# Altium footprint library Footprint.PcbLib: 411 footprints (part 23 of 26)
Each footprint in its own frame and in the unit in brackets; x right, y up, seen from the top. Pads: shape width x height; smd on the part's side, far side on the other; paste and mask are expansions set on the pad; w line width, h text height; cw(c..) or ccw(c..) is an arc to the next point about the centre after c.
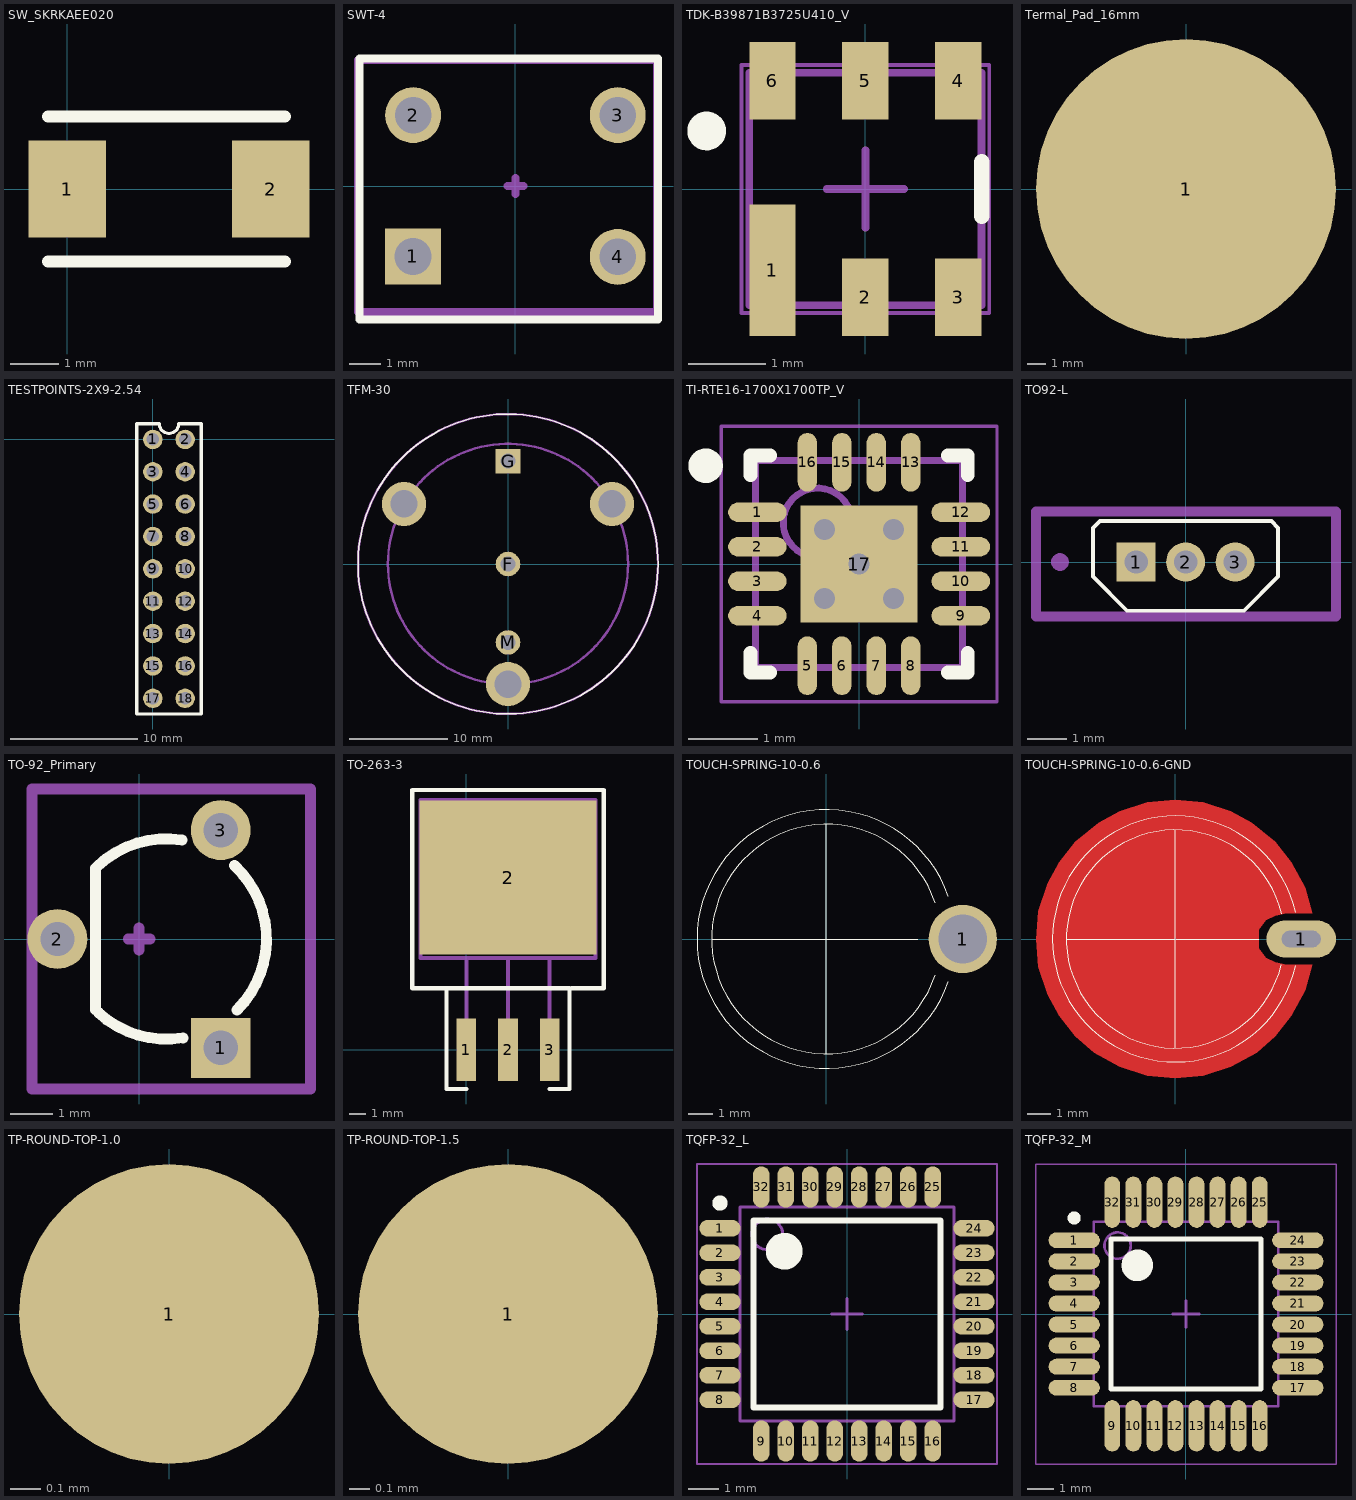
[diagram p22: the footprints below, top view; thin cyan lines are the x and y axes]

## SW_SKRKAEE020 [mm]
pads (2):
  rect 1.6x2 smd: 1(0,0) 2(4.2,0)
Top Overlay:
  lines w0.25: -0.4,-1.5 4.5,-1.5 ; -0.4,1.5 4.5,1.5
3D body "User Library-Pushbutton3x4x2.step": height 2, standoff 0, extent -0.35,-1.45 4.55,1.45

## SWT-4 [mil]
pads (4):
  rect 70x70 hole 46: 1(-128.15,-88.19)
  round 70 hole 45.98: 2(-127.76,88.58) 3(128.15,88.58) 4(128.15,-88.58)
Top Overlay:
  lines w10: -195.08,159.06 -195.08,-166.93 178.15,-166.93 ; -195.08,159.45 178.54,159.45 ; 178.54,-166.93 178.54,159.06
Mechanical 15:
  lines w10: -10,0 10,0 ; 0,-10 0,10 ; -196.85,-157.48 -196.85,157.48 177.17,157.48 177.17,-157.48 -196.85,-157.48
  text ".Designator" at -137.8,177.17 h60

## TDK-B39871B3725U410_V [mm] "SMD, 6-Leads, Body 3x3mm"
height 1.1
pads (6):
  rect 0.6x1.7 smd: 1(-1.2,-1.05)
  rect 0.6x1 smd: 2(0,-1.4) 3(1.2,-1.4) 4(1.2,1.4) 5(0,1.4) 6(-1.2,1.4)
Top Overlay:
  circle w0.25: c-2.05,0.75 r0.125
  lines w0.2: 1.5,-0.35 1.5,0.35
Mechanical 13:
  lines w0.1: -1.5,-1.5 -1.5,1.5 1.5,1.5 1.5,-1.5 -1.5,-1.5
Mechanical 15:
  lines w0.05: -1.6,-1.6 1.6,-1.6 1.6,1.6 -1.6,1.6 -1.6,-1.6
  lines w0.1: -0.5,0 0.5,0 ; 0,-0.5 0,0.5
3D body: height 1.1, standoff 0, extent -1.5,-1.5 1.5,1.5

## Termal_Pad_16mm [mm]
pads (1):
  round 16 smd: 1(0,0)

## TESTPOINTS-2X9-2.54 [mil]
pads (18):
  round 60 hole 38: 1(0,0) 2(100,0) 3(0,-100) 4(100,-100) 5(0,-200) 6(100,-200) 7(0,-300) 8(100,-300) 9(0,-400) 10(100,-400) 11(0,-500) 12(100,-500) 13(0,-600) 14(100,-600) 15(0,-700) 16(100,-700) 17(0,-800) 18(100,-800)
Top Overlay:
  lines w10: -50,-848.43 -50,48.43 20,48.43 ccw(c50,48.43) 80,48.43 150,48.43 150,-848.43 -50,-848.43

## TFM-30 [mm] "Through Hole Circle, 3 pins, 3 mount holes"
height 20
pads (6):
  round 2.5 hole 1.5: F(0,0) M(0,-8)
  rect 2.5x2.5 hole 1.5: G(0,10.5)
  round 4.5 hole 2.8: ""(-10.609,6.125) ""(0,-12.25) ""(10.609,6.125)
Top Overlay:
  circle w0.15: c0,0 r15.3
Mechanical 15:
  circle w0.254: c0,0 r12.25
  circle w0.254: c0,0 r15.3
3D body: height 20, standoff 4, extent -15.3,-15.296 15.3,15.296
3D body: height 4, standoff 0, extent -1.494,-1.497 1.494,1.497
3D body: height 4, standoff 0, extent -1.494,9.003 1.494,11.997
3D body: height 4, standoff 0, extent -1.494,-9.497 1.494,-6.503
3D body: height 4, standoff -3.5, extent 9.468,4.977 11.759,7.273
3D body: height 4, standoff -3.5, extent -1.141,-13.398 1.15,-11.102
3D body: height 4.35, standoff -3.15, extent -11.75,4.977 -9.459,7.273
3D body: height 0, standoff -3.5, extent -0.498,10.001 0.498,10.999
3D body: height 0, standoff -3.5, extent -0.498,-0.499 0.498,0.499
3D body: height 0, standoff -3.5, extent -0.498,-8.499 0.498,-7.501

## TI-RTE16-1700X1700TP_V [mm] "QFN, 16-Leads, Body 3x3mm, Pitch 0.5mm, Thermal Pad 1.7x1.7mm"
height 0.8
pads (17):
  oval 0.85x0.28 smd: 1(-1.475,0.75) 2(-1.475,0.25) 3(-1.475,-0.25) 4(-1.475,-0.75) 9(1.475,-0.75) 10(1.475,-0.25) 11(1.475,0.25) 12(1.475,0.75)
  oval 0.28x0.85 smd: 5(-0.75,-1.475) 6(-0.25,-1.475) 7(0.25,-1.475) 8(0.75,-1.475) 13(0.75,1.475) 14(0.25,1.475) 15(-0.25,1.475) 16(-0.75,1.475)
  rect 1.7x1.7 smd: 17(0,0)
via 0,0 diameter 0.6 hole 0.3
via -0.5,-0.5 diameter 0.6 hole 0.3
via -0.5,0.5 diameter 0.6 hole 0.3
via 0.5,0.5 diameter 0.6 hole 0.3
via 0.5,-0.5 diameter 0.6 hole 0.3
Top Overlay:
  circle w0.25: c-2.225,1.425 r0.125
  lines w0.2: -1.575,-1.29 -1.575,-1.575 -1.29,-1.575 ; -1.575,1.29 -1.575,1.575 -1.29,1.575 ; 1.29,-1.575 1.575,-1.575 1.575,-1.29 ; 1.29,1.575 1.575,1.575 1.575,1.29
Mechanical 13:
  circle w0.1: c-0.6,0.6 r0.5
  lines w0.1: -1.5,-1.5 1.5,-1.5 1.5,1.5 -1.5,1.5 -1.5,-1.5
Mechanical 15:
  lines w0.05: -2,-2 2,-2 2,2 -2,2 -2,-2
  lines w0.1: -0.5,0 0.5,0 ; 0,-0.5 0,0.5
3D body "TI-RTE16-1700X1700TP_V.step": height 0.74, standoff 0, extent -1.626,-1.626 1.626,1.626

## TO92-L [mm]
pads (3):
  rect 1x1 hole 0.6: 1(-1.27,0)
  round 1 hole 0.6: 2(0,0) 3(1.27,0)
Top Overlay:
  lines w0.1: -2.375,-0.375 -1.5,-1.25 1.5,-1.25 2.375,-0.375 2.375,0.875 2.2,1.05 -2.2,1.05 -2.375,0.875 -2.375,-0.375
Mechanical 15:
  circle w0.254: c-3.225,0 r0.1
  lines w0.254: -3.84,-1.4 -3.84,1.3 3.86,1.3 3.86,-1.4 -3.84,-1.4
  text ".Designator" at -3.74,1.6 h1.52
3D body "User Library-PN2907A Transistors PNP TO-92 3L (2,54mm).step": height 19.32, standoff -0.2, extent -2.38,-1.45 2.38,2.18

## TO-92_Primary [mm]
pads (3):
  rect 1.4x1.4 hole 0.8: 1(1.905,-2.54)
  round 1.4 hole 0.8: 2(-1.905,0) 3(1.905,2.54)
Top Overlay:
  lines w0.254: -1.016,-1.651 -1.016,1.651 ; -0.959,1.71 cw(c0.635,0) 1.001,2.309 ; -0.95,-1.718 ccw(c0.635,0) 1.021,-2.306 ; 2.226,1.712 cw(c0.635,0) 2.288,-1.653
Mechanical 15:
  circle w0.254: c1.9,-2.5 r0.1
  lines w0.254: -0.254,0 0.254,0 ; 0,-0.254 0,0.254 ; -2.5,-3.5 4,-3.5 4,3.5 -2.5,3.5 -2.5,-3.5
  text ".Designator" at -1.3,3.8 h1.52

## TO-263-3 [mm]
height 0.6
pads (4):
  rect 1.2x3.8 smd: 1(0,0) 2(2.54,0) 3(5.08,0)
  rect 10.8x9.4 smd: 2(2.54,10.5)
Top Overlay:
  lines w0.25: -1.08,3.746 5.52,3.746 6.3,3.746 6.3,-2.4 5.08,-2.4 ; 0,-2.4 -1.2,-2.4 -1.2,3.746 -2.06,3.746 -3.302,3.746 -3.302,15.343 -3.302,15.843 -1.454,15.843 -0.534,15.843 6.066,15.843 7.046,15.843 8.382,15.843 8.382,15.343 8.382,3.746 6.44,3.746
3D Body Top:
  lines w0.25: 0,0 0,5.588 ; 2.54,0 2.54,5.497 ; 5.08,0 5.08,5.588 ; -2.794,5.588 7.874,5.588 7.874,15.24 -2.794,15.24 -2.794,5.588
3D body "TO263-3.STEP": height 4.78, standoff -0.02, extent -2.46,-0.99 7.54,14.68

## TOUCH-SPRING-10-0.6 [mm]
pads (1):
  round 2.8 hole 2: 1(5.6,0)
Top Overlay:
  lines w0.01: 4.588,-0.35 4.588,0.35 6.238,0.35 6.238,-0.35 4.588,-0.35
  lines w0.025: -4.674,0 1.925,0 3.75,0 ; 0,-4.7 0,2.5 0,4.699 ; 4.466,-1.489 cw(c0.008,0.001) 4.466,1.489 ; 5.009,-1.753 cw(c0.008,0.001) 5.01,1.753

## TOUCH-SPRING-10-0.6-GND [mm]
pads (2):
  oval 3x1.6 hole 0.7 slot 1.675 at 0 deg: 1(5.425,0)
  round 0 smd far side paste-25.4 mask-25.4: 2(0,0)
Top Layer:
  region: 0,-6 1.2,-5.9 2.4,-5.5 3.5,-4.9 4.3,-4.2 5,-3.3 5.6,-2.2 5.9,-1.1 4.8,-1.1 4.3,-1 3.9,-0.8 3.6,-0.4 3.6,0 3.6,0.4 3.9,0.8 4.3,1 4.8,1.1 5.9,1.1 5.6,2.2 5,3.3 4.3,4.2 3.3,5 2.4,5.5 1.2,5.9 0,6 -1.2,5.9 -2.4,5.5 -3.3,5 -4.3,4.2 -5,3.3 -5.5,2.4 -5.9,1.2 -6,0 -5.9,-1.2 -5.5,-2.4 -5,-3.3 -4.3,-4.2 -3.5,-4.9 -2.4,-5.5 -1.2,-5.9
Top Overlay:
  lines w0.025: -4.674,0 3.6,0 ; 0,-4.699 0,4.699 ; 4.573,-1.118 cw(c0.008,0.001) 4.579,1.095 ; 5.182,-1.146 cw(c0.008,0.001) 5.183,1.146

## TP-ROUND-TOP-1.0 [mm]
pads (1):
  round 1 smd: 1(0,0)

## TP-ROUND-TOP-1.5 [mm]
pads (1):
  round 1.5 smd: 1(0,0)

## TQFP-32_L [mm] "Thin QFP, 32-Leads, Body 7x7mm, Pitch 0.8mm, IPC High Density"
height 1.2
pads (32):
  oval 1.35x0.55 smd: 1(-4.15,2.8) 2(-4.15,2) 3(-4.15,1.2) 4(-4.15,0.4) 5(-4.15,-0.4) 6(-4.15,-1.2) 7(-4.15,-2) 8(-4.15,-2.8) 17(4.15,-2.8) 18(4.15,-2) 19(4.15,-1.2) 20(4.15,-0.4) 21(4.15,0.4) 22(4.15,1.2) 23(4.15,2) 24(4.15,2.8)
  oval 0.55x1.35 smd: 9(-2.8,-4.15) 10(-2,-4.15) 11(-1.2,-4.15) 12(-0.4,-4.15) 13(0.4,-4.15) 14(1.2,-4.15) 15(2,-4.15) 16(2.8,-4.15) 25(2.8,4.15) 26(2,4.15) 27(1.2,4.15) 28(0.4,4.15) 29(-0.4,4.15) 30(-1.2,4.15) 31(-2,4.15) 32(-2.8,4.15)
Top Overlay:
  circle w0.6: c-2.05,2.05 r0.3
  circle w0.25: c-4.15,3.625 r0.125
  lines w0.2: -3.05,-3.05 -3.05,3.05 3.05,3.05 3.05,-3.05 -3.05,-3.05
Mechanical 13:
  circle w0.1: c-2.6,2.6 r0.5
  lines w0.1: -3.5,-3.5 3.5,-3.5 3.5,3.5 -3.5,3.5 -3.5,-3.5
Mechanical 15:
  lines w0.05: -4.9,-4.9 4.9,-4.9 4.9,4.9 -4.9,4.9 -4.9,-4.9
  lines w0.1: -0.5,0 0.5,0 ; 0,-0.5 0,0.5
3D body "TQFP32_CMA_MCH.step": height 1.2, standoff 0, extent -4.496,-4.496 4.496,4.496

## TQFP-32_M [mm] "Thin QFP, 32-Leads, Body 7x7mm, Pitch 0.8mm, IPC Low Density"
height 1.2
pads (32):
  oval 1.95x0.6 smd: 1(-4.25,2.8) 2(-4.25,2) 3(-4.25,1.2) 4(-4.25,0.4) 5(-4.25,-0.4) 6(-4.25,-1.2) 7(-4.25,-2) 8(-4.25,-2.8) 17(4.25,-2.8) 18(4.25,-2) 19(4.25,-1.2) 20(4.25,-0.4) 21(4.25,0.4) 22(4.25,1.2) 23(4.25,2) 24(4.25,2.8)
  oval 0.6x1.95 smd: 9(-2.8,-4.25) 10(-2,-4.25) 11(-1.2,-4.25) 12(-0.4,-4.25) 13(0.4,-4.25) 14(1.2,-4.25) 15(2,-4.25) 16(2.8,-4.25) 25(2.8,4.25) 26(2,4.25) 27(1.2,4.25) 28(0.4,4.25) 29(-0.4,4.25) 30(-1.2,4.25) 31(-2,4.25) 32(-2.8,4.25)
Top Overlay:
  circle w0.6: c-1.85,1.85 r0.3
  circle w0.25: c-4.25,3.65 r0.125
  lines w0.2: -2.85,-2.85 2.85,-2.85 2.85,2.85 -2.85,2.85 -2.85,-2.85
Mechanical 13:
  circle w0.1: c-2.6,2.6 r0.5
  lines w0.1: -3.5,-3.5 3.5,-3.5 3.5,3.5 -3.5,3.5 -3.5,-3.5
Mechanical 15:
  lines w0.05: -5.7,-5.7 5.7,-5.7 5.7,5.7 -5.7,5.7 -5.7,-5.7
  lines w0.1: -0.5,0 0.5,0 ; 0,-0.5 0,0.5
3D body "TQFP32_CMA_MCH.step": height 1.2, standoff 0, extent -4.496,-4.496 4.496,4.496